# Altium schematic symbol library 5747845-6.SchLib: 1 symbol
Pins are listed as number, name and electrical type; pins without a type are passive.

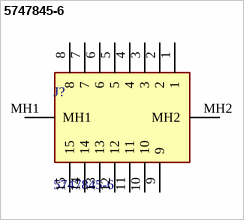
[diagram p0: symbol 5747845-6]

## 5747845-6
designator J?
Body Features: Insert Material Zinc | Mating Feature Material Zinc | Shell Plating Material Tin | Connector Profile Standard | Mating Feature Plating Material Clear Chromate | Assembly Process Feature Material Copper Alloy | Primary Product Color Black | Configuration Features: Number of Positions 15 | PCB Mount Orientation Right Angle | Number of Rows 2 | Contact Features: Contact Shape & Form Round | Contact Mating Area Plating Material Gold | PCB Contact Termination Area Plating Material Tin | Contact Ma; Manufacturer_Name: TE Connectivity; Geometry.Height: 12.929mm; Mouser Part Number: 571-5747845-6; Mouser Price/Stock: https://www.mouser.co.uk/ProductDetail/TE-Connectivity/5747845-6?qs=x6EjVpvqMVN9cHT7h3fiVQ%3D%3D; Manufacturer_Part_Number: 5747845-6; Datasheet Link: https://www.te.com/commerce/DocumentDelivery/DDEController?Action=srchrtrv&DocNm=82068_AMPLIMITE_Right-Angle_Posted_Conn&DocType=Catalog%20Section&DocLang=English&PartCntxt=5747845-6&DocFormat=pdf
footprint 57478456
pins: 1, 2, 3, 4, 5, 6, 7, 8, 9, 10, 11, 12, 13, 14, 15, MH1, MH2